# EAGLE library part MICROSD-MODULE-SPI (library moto-core)
MICROSD-MODULE-SPI Catalex tipi microSD SPI karti (3.3V regulator + level shifter). Kart: 24.0 x 42.0 mm - Guven: M STEP: GrabCAD 'micro SD card module catalex'
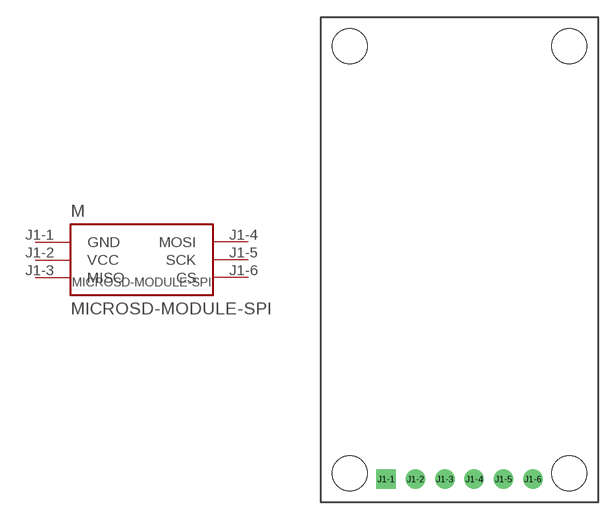
[diagram p4: symbol with the pads of MICROSD-MODULE-SPI; footprint MICROSD-MODULE-SPI]

Designator prefix M

## MICROSD-MODULE-SPI (BOARD_SIZE: 24.0x42.0mm; CONFIDENCE: M)  [MICROSD-MODULE-SPI]
J1-1  GND  pas
J1-2  VCC  pas
J1-3  MISO  pas
J1-4  MOSI  pas
J1-5  SCK  pas
J1-6  CS  pas

## Footprint MICROSD-MODULE-SPI (pad centres in mm)
Catalex tipi microSD SPI karti (3.3V regulator + level shifter). | Kart: 24.0 x 42.0 mm | Guven: M
drill 1 pad 1.7 square: J1-1 -6.35,-19
drill 1 pad 1.7 round: J1-2 -3.81,-19; J1-3 -1.27,-19; J1-4 1.27,-19; J1-5 3.81,-19; J1-6 6.35,-19
hole 3 at -9.5,-18.5
hole 3 at 9.5,-18.5
hole 3 at -9.5,18.5
hole 3 at 9.5,18.5